# Altium footprint library PcbLib1.PcbLib: 69 footprints (part 3 of 5)
Each footprint in its own frame and in the unit in brackets; x right, y up, seen from the top. Pads: shape width x height; smd on the part's side, far side on the other; paste and mask are expansions set on the pad; w line width, h text height; cw(c..) or ccw(c..) is an arc to the next point about the centre after c.
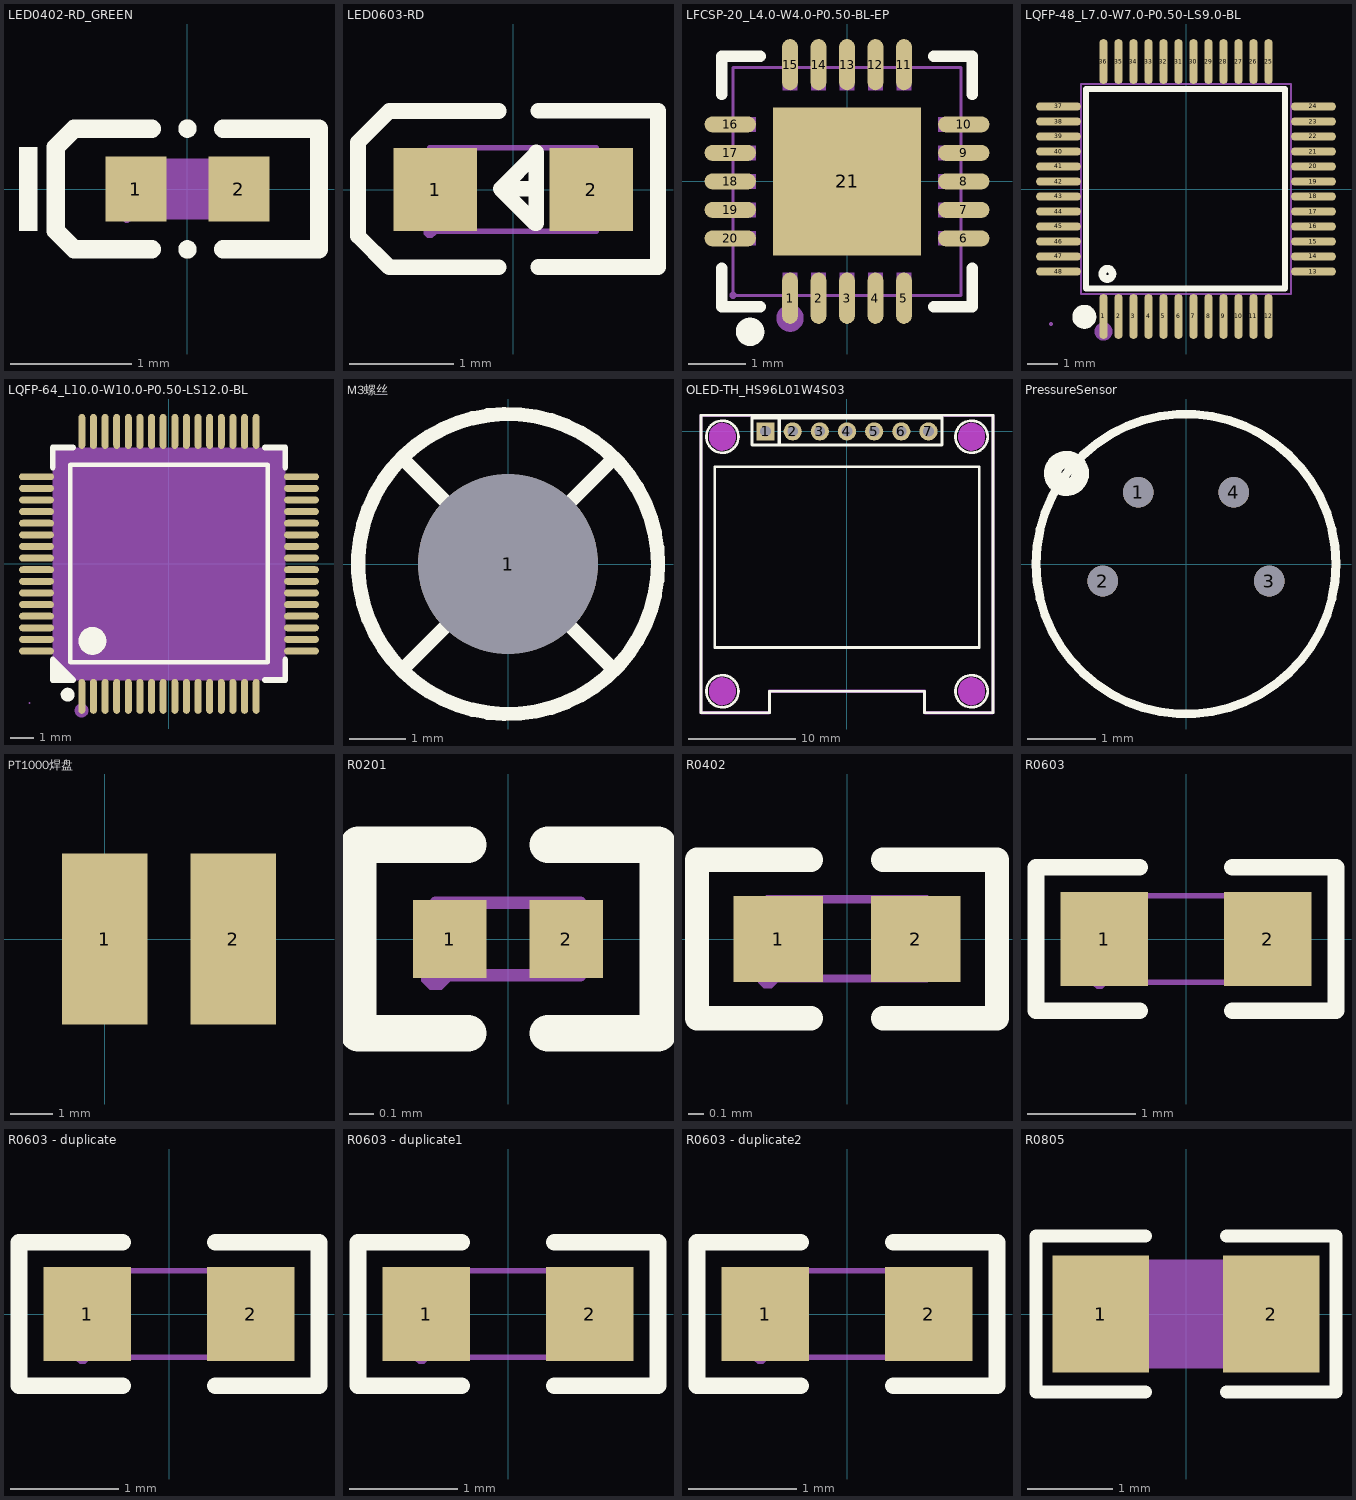
[diagram p2: the footprints below, top view; thin cyan lines are the x and y axes]

## LED0402-RD_GREEN [mm]
pads (2):
  rect 0.5x0.54 smd paste+0 mask+0.051: 1(-0.425,0) 2(0.425,0)
Top Overlay:
  circle w0.076: c0,-0.499 r0.038
  circle w0.076: c0,0.499 r0.038
  region: -1.237,-0.346 -1.237,0.346 -1.39,0.346 -1.39,-0.346
  lines w0.152: -0.296,-0.499 -0.933,-0.499 -1.085,-0.346 -1.085,0.346 -0.933,0.499 -0.296,0.499 ; 0.296,-0.499 1.085,-0.499 1.085,0.499 0.296,0.499
Mechanical 5:
  region: -0.44,-0.03 -0.44,0.03 -0.2,0.03 -0.2,-0.03
  region: 0.44,-0.03 0.44,0.03 0.2,0.03 0.2,-0.03
  region: 0.35,-0.2 0.35,0.2 0.29,0.2 0.29,-0.2
Mechanical 9:
  region: -0.5,-0.25 -0.5,0.25 0.5,0.25 0.5,-0.25
Mechanical 11:
  region: -0.47,-0.25 -0.47,-0.262 -0.487,-0.28 -0.512,-0.28 -0.53,-0.262 -0.53,-0.25 -0.53,-0.238 -0.512,-0.22 -0.487,-0.22 -0.47,-0.238 -0.47,-0.25
Mechanical 12:
  region: -0.5,-0.25 -0.5,0.25 -0.3,0.25 -0.3,-0.25
  region: 0.5,-0.25 0.5,0.25 0.3,0.25 0.3,-0.25

## LED0603-RD [mm]
pads (2):
  rect 0.8x0.8 smd: 1(-0.749,0) 2(0.749,0)
Top Overlay:
  lines w0.15: -0.14,-0.746 -1.19,-0.746 -1.49,-0.446 -1.49,-0.346 -1.49,0.354 -1.49,0.454 -1.19,0.754 -0.14,0.754 ; 0.22,0.007 -0.12,0.007 ; 0.24,-0.744 1.39,-0.744 ; 0.24,0.757 1.39,0.757 1.39,-0.723 ; -0.12,0.007 0.22,0.347 0.22,0.357 0.22,-0.324 0.21,-0.324 -0.12,0.007
Mechanical 2:
  region: 0.529,0.068 1.069,0.068 1.069,-0.062 0.529,-0.062
  region: 0.735,-0.267 0.735,0.273 0.865,0.273 0.865,-0.267
  region: -1.07,0.062 -0.53,0.062 -0.53,-0.068 -1.07,-0.068
Mechanical 6:
  lines w0.051: -0.8,-0.4 0.8,-0.4 0.8,0.4 -0.8,0.4 -0.8,-0.4
Mechanical 8:
  region: -0.739,-0.403 -0.739,-0.428 -0.775,-0.463 -0.824,-0.463 -0.859,-0.428 -0.859,-0.403 -0.859,-0.379 -0.824,-0.344 -0.775,-0.344 -0.739,-0.379 -0.739,-0.403
Mechanical 9:
  region: 0.5,-0.396 0.5,0.404 0.8,0.404 0.8,-0.396
  region: -0.8,-0.403 -0.8,0.397 -0.5,0.397 -0.5,-0.403

## LFCSP-20_L4.0-W4.0-P0.50-BL-EP [mm]
pads (21):
  oval 0.28x0.9 smd paste-100 mask+0.051: 1(-1,-2.05) 2(-0.5,-2.05) 3(0,-2.05) 4(0.5,-2.05) 5(1,-2.05) 11(1,2.05) 12(0.5,2.05) 13(0,2.05) 14(-0.5,2.05) 15(-1,2.05)
  oval 0.9x0.28 smd paste-100 mask+0.051: 6(2.05,-1) 7(2.05,-0.5) 8(2.05,0) 9(2.05,0.5) 10(2.05,1) 16(-2.05,1) 17(-2.05,0.5) 18(-2.05,0) 19(-2.05,-0.5) 20(-2.05,-1)
  rect 2.6x2.6 smd paste-100 mask+0.051: 21(0,0)
Top Overlay:
  lines w0.2: -2.2,-1.525 -2.2,-2.2 -1.525,-2.2 ; -2.2,1.525 -2.2,2.2 -1.525,2.2 ; 1.525,-2.2 2.2,-2.2 2.2,-1.525 ; 1.525,2.2 2.2,2.2 2.2,1.525
  lines w0.25: -1.703,-2.517 ccw(c-1.702,-2.642) -1.701,-2.517
Top Paste:
  drawing of 21 lines, arcs and shapes, not listed
Mechanical 2:
  circle w0.24: c-1,-2.4 r0.12
Mechanical 6:
  lines w0.051: -2,-2 2,-2 2,2 -2,2 -2,-2
Mechanical 8:
  region: -1.94,-2 -1.94,-2.025 -1.975,-2.06 -2.025,-2.06 -2.06,-2.025 -2.06,-2 -2.06,-1.975 -2.025,-1.94 -1.975,-1.94 -1.94,-1.975 -1.94,-2
Mechanical 9:
  region: -1.25,-1.25 -1.25,1.25 1.25,1.25 1.25,-1.25
  region: -2,-1.125 -2,-0.875 -1.6,-0.875 -1.6,-1.125
  region: -2,-0.625 -2,-0.375 -1.6,-0.375 -1.6,-0.625
  region: -2,-0.125 -2,0.125 -1.6,0.125 -1.6,-0.125
  region: -2,0.375 -2,0.625 -1.6,0.625 -1.6,0.375
  region: -2,0.875 -2,1.125 -1.6,1.125 -1.6,0.875
  region: -1.125,1.6 -1.125,2 -0.875,2 -0.875,1.6
  region: -0.625,1.6 -0.625,2 -0.375,2 -0.375,1.6
  region: -0.125,1.6 -0.125,2 0.125,2 0.125,1.6
  region: 0.375,1.6 0.375,2 0.625,2 0.625,1.6
  region: 0.875,1.6 0.875,2 1.125,2 1.125,1.6
  region: 1.6,0.875 1.6,1.125 2,1.125 2,0.875
  region: 1.6,0.375 1.6,0.625 2,0.625 2,0.375
  region: 1.6,-0.125 1.6,0.125 2,0.125 2,-0.125
  region: 1.6,-0.625 1.6,-0.375 2,-0.375 2,-0.625
  region: 1.6,-1.125 1.6,-0.875 2,-0.875 2,-1.125
  region: 0.875,-2 0.875,-1.6 1.125,-1.6 1.125,-2
  region: 0.375,-2 0.375,-1.6 0.625,-1.6 0.625,-2
  region: -0.125,-2 -0.125,-1.6 0.125,-1.6 0.125,-2
  region: -0.625,-2 -0.625,-1.6 -0.375,-1.6 -0.375,-2
  region: -1.125,-2 -1.125,-1.6 -0.875,-1.6 -0.875,-2

## LQFP-48_L7.0-W7.0-P0.50-LS9.0-BL [mm]
pads (48):
  oval 0.27x1.5 smd paste+0 mask+0.05: 1(-2.75,-4.25) 2(-2.25,-4.25) 3(-1.75,-4.25) 4(-1.25,-4.25) 5(-0.75,-4.25) 6(-0.25,-4.25) 7(0.25,-4.25) 8(0.75,-4.25) 9(1.25,-4.25) 10(1.75,-4.25) 11(2.25,-4.25) 12(2.75,-4.25) 25(2.75,4.25) 26(2.25,4.25) 27(1.75,4.25) 28(1.25,4.25) 29(0.75,4.25) 30(0.25,4.25) 31(-0.25,4.25) 32(-0.75,4.25) 33(-1.25,4.25) 34(-1.75,4.25) 35(-2.25,4.25) 36(-2.75,4.25)
  oval 1.5x0.27 smd paste+0 mask+0.05: 13(4.25,-2.75) 14(4.25,-2.25) 15(4.25,-1.75) 16(4.25,-1.25) 17(4.25,-0.75) 18(4.25,-0.25) 19(4.25,0.25) 20(4.25,0.75) 21(4.25,1.25) 22(4.25,1.75) 23(4.25,2.25) 24(4.25,2.75) 37(-4.25,2.75) 38(-4.25,2.25) 39(-4.25,1.75) 40(-4.25,1.25) 41(-4.25,0.75) 42(-4.25,0.25) 43(-4.25,-0.25) 44(-4.25,-0.75) 45(-4.25,-1.25) 46(-4.25,-1.75) 47(-4.25,-2.25) 48(-4.25,-2.75)
Top Overlay:
  circle w0.254: c-2.62,-2.83 r0.17
  lines w0.2: -2.896,3.34 3.302,3.34 3.302,-3.315 -3.327,-3.315 -3.327,3.34 -2.565,3.34
  lines w0.4: -3.39,-4.06 ccw(c-3.389,-4.26) -3.387,-4.06
Mechanical 2:
  circle w0.3: c-2.75,-4.75 r0.15
Mechanical 6:
  lines w0.051: -3.5,-3.5 -3.5,3.5 3.5,3.5 3.5,-3.5 -3.5,-3.5
Mechanical 7:
  drawing of 48 lines, arcs and shapes, not listed
Mechanical 8:
  region: -4.44,-4.5 -4.44,-4.525 -4.475,-4.56 -4.525,-4.56 -4.56,-4.525 -4.56,-4.5 -4.56,-4.475 -4.525,-4.44 -4.475,-4.44 -4.44,-4.475 -4.44,-4.5
Mechanical 9:
  drawing of 48 lines, arcs and shapes, not listed

## LQFP-64_L10.0-W10.0-P0.50-LS12.0-BL [mm]
pads (64):
  oval 0.3x1.5 smd paste+0 mask+0.051: 1(-3.75,-5.7) 2(-3.25,-5.7) 3(-2.75,-5.7) 4(-2.25,-5.7) 5(-1.75,-5.7) 6(-1.25,-5.7) 7(-0.75,-5.7) 8(-0.25,-5.7) 9(0.25,-5.7) 10(0.75,-5.7) 11(1.25,-5.7) 12(1.75,-5.7) 13(2.25,-5.7) 14(2.75,-5.7) 15(3.25,-5.7) 16(3.75,-5.7) 33(3.75,5.7) 34(3.25,5.7) 35(2.75,5.7) 36(2.25,5.7) 37(1.75,5.7) 38(1.25,5.7) 39(0.75,5.7) 40(0.25,5.7) 41(-0.25,5.7) 42(-0.75,5.7) 43(-1.25,5.7) 44(-1.75,5.7) 45(-2.25,5.7) 46(-2.75,5.7) 47(-3.25,5.7) 48(-3.75,5.7)
  oval 1.5x0.3 smd paste+0 mask+0.051: 17(5.7,-3.75) 18(5.7,-3.25) 19(5.7,-2.75) 20(5.7,-2.25) 21(5.7,-1.75) 22(5.7,-1.25) 23(5.7,-0.75) 24(5.7,-0.25) 25(5.7,0.25) 26(5.7,0.75) 27(5.7,1.25) 28(5.7,1.75) 29(5.7,2.25) 30(5.7,2.75) 31(5.7,3.25) 32(5.7,3.75) 49(-5.7,3.75) 50(-5.7,3.25) 51(-5.7,2.75) 52(-5.7,2.25) 53(-5.7,1.75) 54(-5.7,1.25) 55(-5.7,0.75) 56(-5.7,0.25) 57(-5.7,-0.25) 58(-5.7,-0.75) 59(-5.7,-1.25) 60(-5.7,-1.75) 61(-5.7,-2.25) 62(-5.7,-2.75) 63(-5.7,-3.25) 64(-5.7,-3.75)
Top Overlay:
  region: -4.131,-4.988 -5,-4.119 -5,-4.988
  lines w0.2: -4.25,-4.238 4.25,-4.238 4.25,4.262 -4.25,4.262 -4.25,-4.238
  lines w0.254: -5,4.143 -5,5.012 -4.131,5.012 ; 4.131,-4.988 5,-4.988 5,-4.119 ; 4.131,5.012 5,5.012 5,4.143 ; -5,-4.119 -5,-4.988 -4.131,-4.988 -5,-4.119 ; -5,-4.119 -5,-4.119
  lines w0.3: -4.361,-5.478 ccw(c-4.36,-5.628) -4.359,-5.478
  lines w0.6: -3.299,-3.013 ccw(c-3.297,-3.313) -3.294,-3.013
Mechanical 5:
  circle w0.3: c-3.76,-6.308 r0.15
Mechanical 9:
  region: -5,5 5,5 5,-5 -5,-5
Mechanical 10:
  drawing of 64 lines, arcs and shapes, not listed
Mechanical 11:
  region: -5.97,-5.988 -5.97,-6.001 -5.988,-6.018 -6.012,-6.018 -6.03,-6.001 -6.03,-5.988 -6.03,-5.976 -6.012,-5.958 -5.988,-5.958 -5.97,-5.976 -5.97,-5.988
Mechanical 12:
  drawing of 64 lines, arcs and shapes, not listed

## M3螺丝 [mil]
pads (1):
  round 126 hole 126 paste-99999 mask+4: 1(0,0)
Top Overlay:
  circle w10: c0,0 r105
  lines w10: -72.5,-72.5 72.5,72.5 ; -72.5,72.5 72.5,-72.5

## OLED-TH_HS96L01W4S03 [mm]
pads (7):
  rect 1.7x1.7 hole 1: 1(-7.62,0)
  round 1.7 hole 1: 2(-5.08,0) 3(-2.54,0) 4(0,0) 5(2.54,0) 6(5.08,0) 7(7.62,0)
Top Overlay:
  circle w0.254: c-11.65,-24.3 r1.5
  circle w0.254: c11.65,-24.3 r1.5
  circle w0.254: c11.65,-0.5 r1.5
  circle w0.254: c-11.65,-0.5 r1.5
  lines w0.254: -13.65,-26.3 -7.25,-26.3 -7.25,-24.3 7.25,-24.3 7.25,-26.3 13.65,-26.3 13.65,1.5 -13.65,1.5 -13.65,-26.3 ; -12.37,-20.2 12.37,-20.2 12.37,-3.3 -12.37,-3.3 -12.37,-20.2
  lines w0.31: -6.35,-1.27 -6.35,1.27 ; 8.89,1.27 -8.89,1.27 -8.89,-1.27 8.89,-1.27 8.89,1.29
Keep-Out Layer:
  board cut-out: 12.9,-0.5 12.9,-0.664 12.815,-0.982 12.65,-1.267 12.417,-1.5 12.132,-1.665 11.815,-1.75 11.485,-1.75 11.167,-1.665 10.882,-1.5 10.65,-1.267 10.485,-0.982 10.4,-0.664 10.4,-0.5 10.4,-0.335 10.485,-0.017 10.65,0.268 10.882,0.5 11.167,0.665 11.485,0.75 11.815,0.75 12.132,0.665 12.417,0.5 12.65,0.268 12.815,-0.017 12.9,-0.335 12.9,-0.5
  board cut-out: -10.4,-0.5 -10.4,-0.664 -10.485,-0.982 -10.65,-1.267 -10.882,-1.5 -11.167,-1.665 -11.485,-1.75 -11.815,-1.75 -12.132,-1.665 -12.417,-1.5 -12.65,-1.267 -12.815,-0.982 -12.9,-0.664 -12.9,-0.5 -12.9,-0.335 -12.815,-0.017 -12.65,0.268 -12.417,0.5 -12.132,0.665 -11.815,0.75 -11.485,0.75 -11.167,0.665 -10.882,0.5 -10.65,0.268 -10.485,-0.017 -10.4,-0.335 -10.4,-0.5
  board cut-out: -10.4,-24.3 -10.4,-24.464 -10.485,-24.782 -10.65,-25.067 -10.882,-25.3 -11.167,-25.465 -11.485,-25.55 -11.815,-25.55 -12.132,-25.465 -12.417,-25.3 -12.65,-25.067 -12.815,-24.782 -12.9,-24.464 -12.9,-24.3 -12.9,-24.135 -12.815,-23.817 -12.65,-23.532 -12.417,-23.3 -12.132,-23.135 -11.815,-23.05 -11.485,-23.05 -11.167,-23.135 -10.882,-23.3 -10.65,-23.532 -10.485,-23.817 -10.4,-24.135 -10.4,-24.3
  board cut-out: 12.9,-24.3 12.9,-24.464 12.815,-24.782 12.65,-25.067 12.417,-25.3 12.132,-25.465 11.815,-25.55 11.485,-25.55 11.167,-25.465 10.882,-25.3 10.65,-25.067 10.485,-24.782 10.4,-24.464 10.4,-24.3 10.4,-24.135 10.485,-23.817 10.65,-23.532 10.882,-23.3 11.167,-23.135 11.485,-23.05 11.815,-23.05 12.132,-23.135 12.417,-23.3 12.65,-23.532 12.815,-23.817 12.9,-24.135 12.9,-24.3
Keep-Out Layer:
  drawing of 12 lines, arcs and shapes, not listed
Mechanical 1:
  circle w0.003: c11.65,-0.5 r1.25
  circle w0.003: c-11.65,-0.5 r1.25
  circle w0.003: c-11.65,-24.3 r1.25
  circle w0.003: c11.65,-24.3 r1.25
Mechanical 2:
  circle w1.25: c-11.65,-0.5 r0.625
  circle w1.25: c11.65,-0.5 r0.625
  circle w1.25: c11.65,-24.3 r0.625
  circle w1.25: c-11.65,-24.3 r0.625
  region: -13.523,1.5 -13.523,-26.173 -7.377,-26.173 -7.377,-24.3 -7.367,-24.251 -7.34,-24.21 -7.299,-24.183 -7.25,-24.173 7.25,-24.173 7.299,-24.183 7.34,-24.21 7.367,-24.251 7.377,-24.3 7.377,-26.173 13.523,-26.173 13.523,1.5 13.533,1.549 13.56,1.59 13.601,1.617 13.65,1.627 13.699,1.617 13.74,1.59 13.767,1.549 13.777,1.5 13.777,-26.3 13.767,-26.349 13.74,-26.39 13.699,-26.417 13.65,-26.427 7.25,-26.427 7.201,-26.417 7.16,-26.39 7.133,-26.349 7.123,-26.3 7.123,-24.427 -7.123,-24.427 -7.123,-26.3 -7.133,-26.349 -7.16,-26.39 -7.201,-26.417 -7.25,-26.427 -13.65,-26.427 -13.699,-26.417 -13.74,-26.39 -13.767,-26.349 -13.777,-26.3 -13.777,1.5 -13.767,1.549 -13.74,1.59 -13.699,1.617 -13.65,1.627 -13.601,1.617 -13.56,1.59 -13.533,1.549
  region: 13.65,1.373 -13.65,1.373 -13.699,1.383 -13.74,1.41 -13.767,1.451 -13.777,1.5 -13.767,1.549 -13.74,1.59 -13.699,1.617 -13.65,1.627 13.65,1.627 13.699,1.617 13.74,1.59 13.767,1.549 13.777,1.5 13.767,1.451 13.74,1.41 13.699,1.383
Mechanical 6:
  lines w0.051: -13.65,-26.3 -13.65,1.5 13.65,1.5 13.65,-26.3 7.25,-26.3 7.25,-24.3 -7.25,-24.3 -7.25,-26.3 -13.65,-26.3
Mechanical 8:
  region: -13.59,-26.3 -13.59,-26.325 -13.625,-26.36 -13.675,-26.36 -13.71,-26.325 -13.71,-26.3 -13.71,-26.275 -13.675,-26.24 -13.625,-26.24 -13.59,-26.275 -13.59,-26.3
Mechanical 9:
  region: -7.94,0.32 -7.3,0.32 -7.3,-0.32 -7.94,-0.32
  region: -5.4,0.32 -4.76,0.32 -4.76,-0.32 -5.4,-0.32
  region: -2.86,0.32 -2.22,0.32 -2.22,-0.32 -2.86,-0.32
  region: -0.32,0.32 0.32,0.32 0.32,-0.32 -0.32,-0.32
  region: 2.22,0.32 2.86,0.32 2.86,-0.32 2.22,-0.32
  region: 4.76,0.32 5.4,0.32 5.4,-0.32 4.76,-0.32
  region: 7.3,0.32 7.94,0.32 7.94,-0.32 7.3,-0.32

## PressureSensor [mm]
pads (4):
  round 0.45 / inner round 1.15 / far side round 1.15 hole 0.45: 1(-0.7,1.05) 2(-1.22,-0.25) 3(1.22,-0.25) 4(0.7,1.05)
Top Overlay:
  circle w0.127: c0,0 r2.2
  circle w0.254: c-1.753,1.329 r0.203

## PT1000焊盘 [mm]
pads (2):
  rect 2x4 smd: 1(0,0) 2(3,0)

## R0201 [mm]
pads (2):
  rect 0.303x0.324 smd paste-100 mask+0.051: 1(-0.242,0) 2(0.242,0)
Top Overlay:
  lines w0.152: -0.166,-0.391 -0.622,-0.391 -0.622,0.391 -0.166,0.391 ; 0.166,-0.391 0.622,-0.391 0.622,0.391 0.166,0.391
Top Paste:
  region: -0.081,-0.138 -0.081,0.138 -0.105,0.162 -0.369,0.162 -0.393,0.138 -0.393,-0.138 -0.369,-0.162 -0.105,-0.162
  region: 0.081,-0.138 0.081,0.138 0.105,0.162 0.369,0.162 0.393,0.138 0.393,-0.138 0.369,-0.162 0.105,-0.162
Mechanical 6:
  lines w0.051: -0.3,-0.15 0.3,-0.15 0.3,0.15 -0.3,0.15 -0.3,-0.15
Mechanical 8:
  region: -0.24,-0.15 -0.24,-0.175 -0.275,-0.21 -0.325,-0.21 -0.36,-0.175 -0.36,-0.15 -0.36,-0.125 -0.325,-0.09 -0.275,-0.09 -0.24,-0.125 -0.24,-0.15
Mechanical 9:
  region: 0.3,-0.15 0.3,0.15 0.15,0.15 0.15,-0.15
  region: -0.3,-0.15 -0.3,0.15 -0.15,0.15 -0.15,-0.15

## R0402 [mm]
pads (2):
  rect 0.566x0.54 smd paste-100 mask+0.051: 1(-0.433,0) 2(0.433,0)
Top Overlay:
  lines w0.152: -0.226,-0.499 -0.944,-0.499 -0.944,0.499 -0.226,0.499 ; 0.226,-0.499 0.944,-0.499 0.944,0.499 0.226,0.499
Top Paste:
  region: -0.135,-0.23 -0.135,0.23 -0.175,0.27 -0.676,0.27 -0.716,0.23 -0.716,-0.23 -0.676,-0.27 -0.175,-0.27
  region: 0.135,-0.23 0.135,0.23 0.175,0.27 0.676,0.27 0.716,0.23 0.716,-0.23 0.676,-0.27 0.175,-0.27
Mechanical 6:
  lines w0.051: -0.5,-0.25 0.5,-0.25 0.5,0.25 -0.5,0.25 -0.5,-0.25
Mechanical 8:
  region: -0.44,-0.25 -0.44,-0.275 -0.475,-0.31 -0.525,-0.31 -0.56,-0.275 -0.56,-0.25 -0.56,-0.225 -0.525,-0.19 -0.475,-0.19 -0.44,-0.225 -0.44,-0.25
Mechanical 9:
  region: -0.249,0.25 -0.249,-0.25 -0.499,-0.25 -0.499,0.25
  region: 0.251,-0.25 0.251,0.25 0.501,0.25 0.501,-0.25

## R0603 [mm]
pads (2):
  rect 0.806x0.864 smd paste-100 mask+0.051: 1(-0.753,0) 2(0.753,0)
Top Overlay:
  lines w0.152: -0.426,-0.661 -1.385,-0.661 -1.385,0.661 -0.426,0.661 ; 0.426,-0.661 1.385,-0.661 1.385,0.661 0.426,0.661
Top Paste:
  region: -1.195,-0.45 -0.395,-0.45 -0.345,-0.4 -0.345,-0.172 -0.715,-0.172 -0.715,0.158 -0.345,0.158 -0.345,0.4 -0.395,0.45 -1.195,0.45 -1.245,0.4 -1.245,-0.4
  region: 1.195,0.45 0.395,0.45 0.345,0.4 0.345,0.172 0.715,0.172 0.715,-0.158 0.345,-0.158 0.345,-0.4 0.395,-0.45 1.195,-0.45 1.245,-0.4 1.245,0.4
Mechanical 6:
  lines w0.051: -0.8,-0.4 0.8,-0.4 0.8,0.4 -0.8,0.4 -0.8,-0.4
Mechanical 8:
  region: -0.74,-0.4 -0.74,-0.425 -0.775,-0.46 -0.825,-0.46 -0.86,-0.425 -0.86,-0.4 -0.86,-0.375 -0.825,-0.34 -0.775,-0.34 -0.74,-0.375 -0.74,-0.4
Mechanical 9:
  region: 0.8,-0.4 0.8,0.4 0.5,0.4 0.5,-0.4
  region: -0.8,-0.4 -0.8,0.4 -0.5,0.4 -0.5,-0.4

## R0603 - duplicate [mm]
pads (2):
  rect 0.806x0.864 smd paste-100 mask+0.051: 1(-0.753,0) 2(0.753,0)
Top Overlay:
  lines w0.152: -0.426,-0.661 -1.385,-0.661 -1.385,0.661 -0.426,0.661 ; 0.426,-0.661 1.385,-0.661 1.385,0.661 0.426,0.661
Top Paste:
  region: 1.195,0.45 0.395,0.45 0.345,0.4 0.345,0.172 0.715,0.172 0.715,-0.158 0.345,-0.158 0.345,-0.4 0.395,-0.45 1.195,-0.45 1.245,-0.4 1.245,0.4
  region: -1.195,-0.45 -0.395,-0.45 -0.345,-0.4 -0.345,-0.172 -0.715,-0.172 -0.715,0.158 -0.345,0.158 -0.345,0.4 -0.395,0.45 -1.195,0.45 -1.245,0.4 -1.245,-0.4
Mechanical 6:
  lines w0.051: -0.8,-0.4 -0.8,0.4 0.8,0.4 0.8,-0.4 -0.8,-0.4
Mechanical 8:
  region: -0.74,-0.4 -0.74,-0.425 -0.775,-0.46 -0.825,-0.46 -0.86,-0.425 -0.86,-0.4 -0.86,-0.375 -0.825,-0.34 -0.775,-0.34 -0.74,-0.375 -0.74,-0.4
Mechanical 9:
  region: -0.8,-0.4 -0.8,0.4 -0.5,0.4 -0.5,-0.4
  region: 0.8,-0.4 0.8,0.4 0.5,0.4 0.5,-0.4

## R0603 - duplicate1 [mm]
pads (2):
  rect 0.806x0.864 smd paste-100 mask+0.051: 1(-0.753,0) 2(0.753,0)
Top Overlay:
  lines w0.152: -0.426,-0.661 -1.385,-0.661 -1.385,0.661 -0.426,0.661 ; 0.426,-0.661 1.385,-0.661 1.385,0.661 0.426,0.661
Top Paste:
  region: -1.195,-0.45 -0.395,-0.45 -0.345,-0.4 -0.345,-0.172 -0.715,-0.172 -0.715,0.158 -0.345,0.158 -0.345,0.4 -0.395,0.45 -1.195,0.45 -1.245,0.4 -1.245,-0.4
  region: 1.195,0.45 0.395,0.45 0.345,0.4 0.345,0.172 0.715,0.172 0.715,-0.158 0.345,-0.158 0.345,-0.4 0.395,-0.45 1.195,-0.45 1.245,-0.4 1.245,0.4
Mechanical 6:
  lines w0.051: -0.8,-0.4 0.8,-0.4 0.8,0.4 -0.8,0.4 -0.8,-0.4
Mechanical 8:
  region: -0.74,-0.4 -0.74,-0.425 -0.775,-0.46 -0.825,-0.46 -0.86,-0.425 -0.86,-0.4 -0.86,-0.375 -0.825,-0.34 -0.775,-0.34 -0.74,-0.375 -0.74,-0.4
Mechanical 9:
  region: 0.8,-0.4 0.8,0.4 0.5,0.4 0.5,-0.4
  region: -0.8,-0.4 -0.8,0.4 -0.5,0.4 -0.5,-0.4

## R0603 - duplicate2 [mm]
pads (2):
  rect 0.806x0.864 smd paste-100 mask+0.051: 1(-0.753,0) 2(0.753,0)
Top Overlay:
  lines w0.152: -0.426,-0.661 -1.385,-0.661 -1.385,0.661 -0.426,0.661 ; 0.426,-0.661 1.385,-0.661 1.385,0.661 0.426,0.661
Top Paste:
  region: 1.195,0.45 0.395,0.45 0.345,0.4 0.345,0.172 0.715,0.172 0.715,-0.158 0.345,-0.158 0.345,-0.4 0.395,-0.45 1.195,-0.45 1.245,-0.4 1.245,0.4
  region: -1.195,-0.45 -0.395,-0.45 -0.345,-0.4 -0.345,-0.172 -0.715,-0.172 -0.715,0.158 -0.345,0.158 -0.345,0.4 -0.395,0.45 -1.195,0.45 -1.245,0.4 -1.245,-0.4
Mechanical 6:
  lines w0.051: -0.8,-0.4 -0.8,0.4 0.8,0.4 0.8,-0.4 -0.8,-0.4
Mechanical 8:
  region: -0.74,-0.4 -0.74,-0.425 -0.775,-0.46 -0.825,-0.46 -0.86,-0.425 -0.86,-0.4 -0.86,-0.375 -0.825,-0.34 -0.775,-0.34 -0.74,-0.375 -0.74,-0.4
Mechanical 9:
  region: -0.8,-0.4 -0.8,0.4 -0.5,0.4 -0.5,-0.4
  region: 0.8,-0.4 0.8,0.4 0.5,0.4 0.5,-0.4

## R0805 [mm]
pads (2):
  rect 1.133x1.377 smd paste-100 mask+0.051: 1(-1,0) 2(1,0)
Top Overlay:
  lines w0.152: -0.476,-0.917 -1.761,-0.917 -1.761,0.917 -0.476,0.917 ; 0.476,-0.917 1.761,-0.917 1.761,0.917 0.476,0.917
Top Paste:
  region: 0.45,-0.64 0.45,-0.22 0.895,-0.22 0.895,0.23 0.455,0.23 0.45,0.64 0.5,0.69 1.65,0.69 1.7,0.64 1.7,-0.64 1.65,-0.69 0.5,-0.69
  region: -1.7,-0.64 -1.7,0.64 -1.65,0.69 -0.5,0.69 -0.45,0.64 -0.445,0.23 -0.895,0.23 -0.895,-0.22 -0.455,-0.22 -0.45,-0.64 -0.5,-0.69 -1.65,-0.69
Mechanical 9:
  region: -1,-0.637 -1,0.637 1,0.637 1,-0.637
Mechanical 11:
  region: -0.97,-0.638 -0.97,-0.65 -0.988,-0.668 -1.012,-0.668 -1.03,-0.65 -1.03,-0.638 -1.03,-0.625 -1.012,-0.608 -0.988,-0.608 -0.97,-0.625 -0.97,-0.638
Mechanical 12:
  region: 1,-0.637 1,0.637 0.6,0.637 0.6,-0.637
  region: -1,-0.637 -1,0.637 -0.6,0.637 -0.6,-0.637